# Altium schematic symbol library SamacSys.SchLib: 5 symbols
Pins are listed as number, name and electrical type; pins without a type are passive.

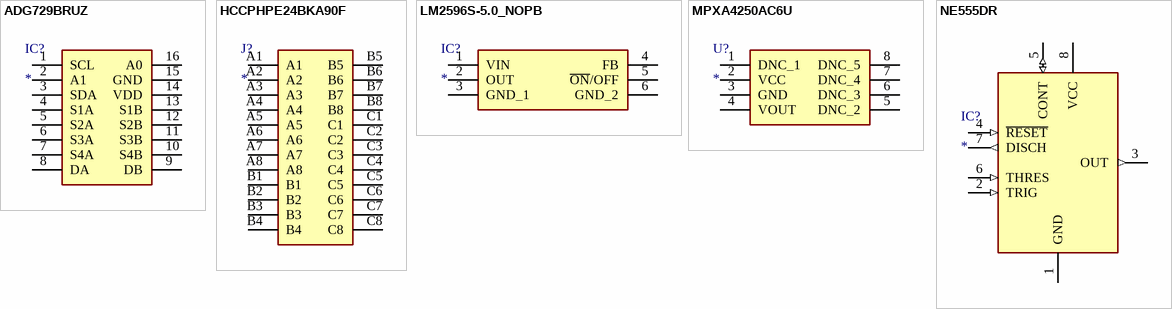
[diagram p0: symbols ADG729BRUZ to NE555DR]

## ADG729BRUZ
designator IC?
Integrated Circuit; Manufacturer_Name: Analog Devices; Manufacturer_Part_Number: ADG729BRUZ; Description: CMOS; Datasheet Link: https://componentsearchengine.com/Datasheets/2/ADG729BRUZ.pdf; Height: 1.2mm; Mouser Part Number: 584-ADG729BRUZ; Mouser Price/Stock: https://www.mouser.co.uk/ProductDetail/Analog-Devices/ADG729BRUZ?qs=BpaRKvA4VqGOrPO6FEWg%252Bw%3D%3D; Arrow Part Number: ADG729BRUZ; Arrow Price/Stock: https://www.arrow.com/en/products/adg729bruz/analog-devices
footprint SOP65P640X120-16N
pins: 1 SCL, 2 A1, 3 SDA, 4 S1A, 5 S2A, 6 S3A, 7 S4A, 8 DA, 9 DB, 10 S4B, 11 S3B, 12 S2B, 13 S1B, 14 VDD, 15 GND, 16 A0

## HCCPHPE24BKA90F
designator J?
Connector; Manufacturer_Name: Aptiv; Manufacturer_Part_Number: HCCPHPE24BKA90F; Datasheet Link: https://componentsearchengine.com/Datasheets/1/HCCPHPE24BKA90F.pdf; Height: 27mm; Mouser Part Number: 649-HCCPHPE24BKA90F; Mouser Price/Stock: https://www.mouser.co.uk/ProductDetail/Aptiv-formerly-Delphi/HCCPHPE24BKA90F?qs=HumNWfwekiHLtOzWAlzo4Q%3D%3D; Arrow Part Number: HCCPHPE24BKA90F; Arrow Price/Stock: https://www.arrow.com/en/products/hccphpe24bka90f/aptiv?utm_currency=USD&region=europe
footprint HCCPHPE24BKA90F
pins: A1, A2, A3, A4, A5, A6, A7, A8, B1, B2, B3, B4, B5, B6, B7, B8, C1, C2, C3, C4, C5, C6, C7, C8

## LM2596S-5.0_NOPB
designator IC?
Integrated Circuit; Manufacturer_Name: Texas Instruments; Manufacturer_Part_Number: LM2596S-5.0/NOPB; Datasheet Link: https://www.ti.com/lit/gpn/LM2596; Mouser Part Number: 926-LM2596S-5.0/NOPB; Mouser Price/Stock: https://www.mouser.co.uk/ProductDetail/Texas-Instruments/LM2596S-5.0-NOPB?qs=X1J7HmVL2ZHVjCOmW%252BYINA%3D%3D; Arrow Part Number: LM2596S-5.0/NOPB; Arrow Price/Stock: https://www.arrow.com/en/products/lm2596s-5.0nopb/texas-instruments?utm_currency=USD&region=nac
footprint KTT0005B
pins: 1 VIN, 2 OUT, 3 GND_1, 4 FB, 5 ~{ON}/OFF, 6 GND_2

## MPXA4250AC6U
designator U?
Undefined or Miscellaneous; Manufacturer_Name: NXP; Manufacturer_Part_Number: MPXA4250AC6U; Datasheet Link: http://www.nxp.com/docs/en/data-sheet/MPX4250A.pdf; Height: 13.21mm; Mouser Part Number: 841-MPXA4250AC6U; Mouser Price/Stock: https://www.mouser.co.uk/ProductDetail/NXP-Semiconductors/MPXA4250AC6U?qs=r8OyiFxb6ReTWAhl%252B7c3ZA%3D%3D; Arrow Part Number: MPXA4250AC6U; Arrow Price/Stock: https://www.arrow.com/en/products/mpxa4250ac6u/nxp-semiconductors?region=nac
footprint SOP254P1821X1321-8N
pins: 1 DNC_1, 2 VCC, 3 GND, 4 VOUT, 5 DNC_2, 6 DNC_3, 7 DNC_4, 8 DNC_5

## NE555DR
designator IC?
Integrated Circuit; Manufacturer_Name: Texas Instruments; Manufacturer_Part_Number: NE555DR; Datasheet Link: http://www.ti.com/lit/ds/symlink/ne555.pdf; Height: 1.75mm; Mouser Part Number: 595-NE555DR; Mouser Price/Stock: https://www.mouser.com/Search/Refine.aspx?Keyword=595-NE555DR; RS Part Number: 1218414; RS Price/Stock: http://uk.rs-online.com/web/p/products/1218414
footprint SOIC127P600X175-8N
pins: 1 GND (power), 2 TRIG (in), 3 OUT (out), 4 ~{RESET} (in), 5 CONT (io), 6 THRES (in), 7 DISCH (out), 8 VCC (power)